# EAGLE library part HDR-2X03 (library connectors)
Pin header 2 x 3
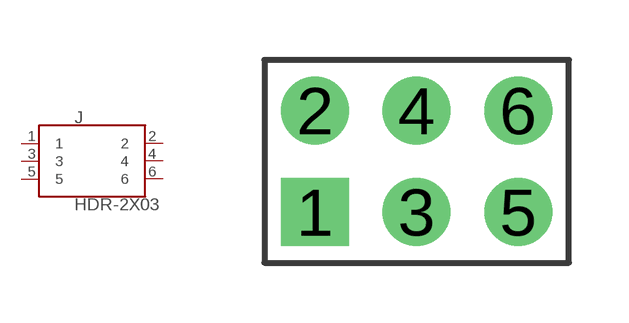
[diagram p4: symbol with the pads of HDR-2X03; footprint HDR-2X03]

Designator prefix J

## HDR-2X03  [HDR-2X03]
1  1  pas
2  2  pas
3  3  pas
4  4  pas
5  5  pas
6  6  pas

## Footprint HDR-2X03 (pad centres in mm)
Pin header, 2 rows of 3, pitch 2.54 mm. Sizes: 0.1 inch (2.54 mm) pin strip grid; pads worked out for this kit. Not verified against a datasheet.
drill 1 pad 1.7 square: 1 -2.54,-1.27
drill 1 pad 1.7: 2 -2.54,1.27; 3 0,-1.27; 4 0,1.27; 5 2.54,-1.27; 6 2.54,1.27